# Altium schematic symbol library LoRa-Wireless-Module-Symbol.SchLib: 1 symbol
Pins are listed as number, name and electrical type; pins without a type are passive.

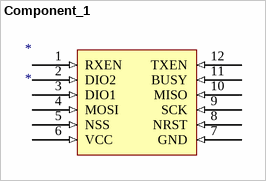
[diagram p0: symbol Component_1]

## Component_1
designator *
pins: 1 RXEN (in), 2 DIO2 (in), 3 DIO1 (in), 4 MOSI (in), 5 NSS (in), 6 VCC (in), 7 GND (in), 8 NRST (in), 9 SCK (in), 10 MISO (in), 11 BUSY (in), 12 TXEN (in)